# Altium footprint library mod_misc.PcbLib: 1 footprints
Each footprint in its own frame and in the unit in brackets; x right, y up, seen from the top. Pads: shape width x height; smd on the part's side, far side on the other; paste and mask are expansions set on the pad; w line width, h text height; cw(c..) or ccw(c..) is an arc to the next point about the centre after c.
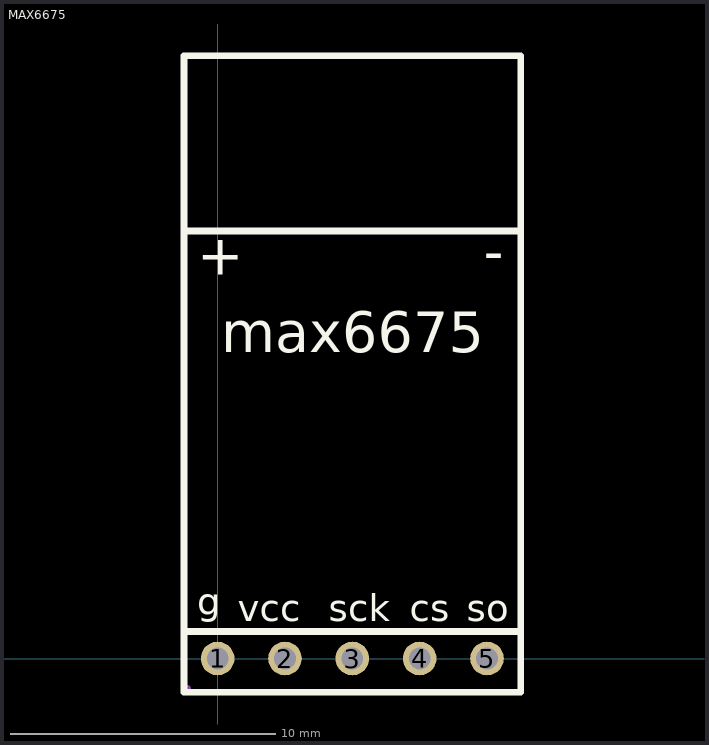
[diagram p0: the footprint, top view; thin cyan lines are the x and y axes]

## MAX6675 [mil]
pads (5):
  round 50 hole 32: 1(0,0) 2(100,0) 3(200,0) 4(300,0) 5(400,0)
Top Overlay:
  lines w10: -50,40 450,40 ; -50,635 450,635 ; -50,-50 -50,895 450,895 450,-50 -50,-50
  text "+" at -30,570 h60
  text "-" at 395,575 h60
  text "max6675" at 5,455 h60
  text "g" at -30,65 h40
  text "vcc" at 30,55 h40
  text "sck" at 165,55 h40
  text "cs" at 285,55 h40
  text "so" at 370,55 h40
Mechanical 13:
  lines w2: -50,-50 -50,895 450,895 450,-50 -50,-50
Mechanical 14:
  region: -40,-45 -40,-45.99 -40.76,-47.83 -42.17,-49.24 -44.01,-50 -45,-50 -45.99,-50 -47.83,-49.24 -49.24,-47.83 -50,-45.99 -50,-45 -50,-44.01 -49.24,-42.17 -47.83,-40.76 -45.99,-40 -45,-40 -44.01,-40 -42.17,-40.76 -40.76,-42.17 -40,-44.01
  lines w2: -50,-50 450,-50 450,895 -50,895 -50,-50
  text ".Designator" at -31,-20 h80
3D body "max6675.step": height 393.7, standoff -339.03, extent -50,-50 450,894.88